# Altium footprint library TBA 1-1211E.PcbLib: 1 footprints
Each footprint in its own frame and in the unit in brackets; x right, y up, seen from the top. Pads: shape width x height; smd on the part's side, far side on the other; paste and mask are expansions set on the pad; w line width, h text height; cw(c..) or ccw(c..) is an arc to the next point about the centre after c.
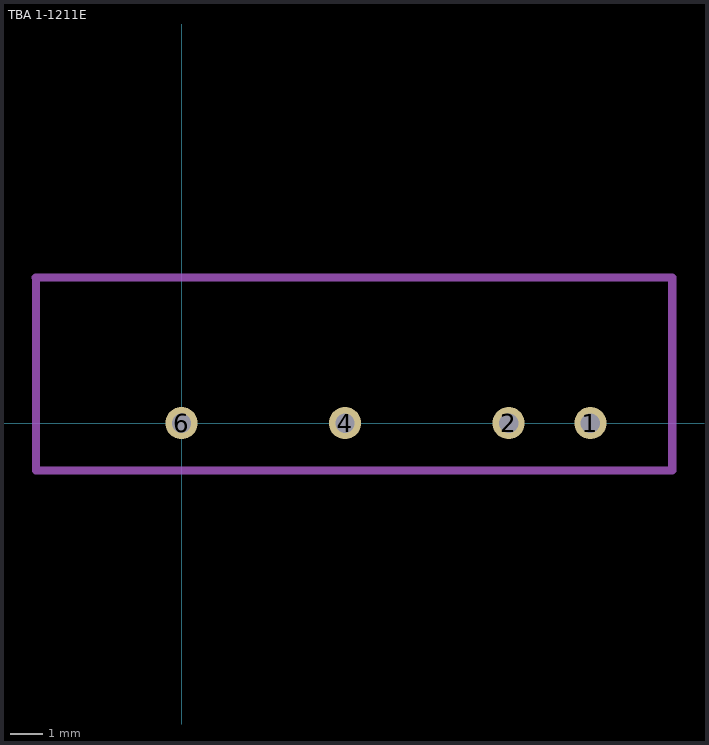
[diagram p0: the footprint, top view; thin cyan lines are the x and y axes]

## TBA 1-1211E [mm] "Converter: DC/DC; 1W; Uin: 10.8÷13.2VDC; Uout: 5VDC; Iout: 200mA"
height 9.5
pads (4):
  round 1 hole 0.6: 1(12.7,0) 2(10.16,0) 4(5.08,0) 6(0,0)
Mechanical 1:
  lines w0.254: -4.525,4.525 -2.4,4.525 15.24,4.525 15.24,-1.475 -2.4,-1.475 -4.523,-1.475 -4.523,4.523 -4.525,4.525
3D body "tba1e_single_3d_drawing.stp": height 10, standoff -3.05, extent -4.416,-1.397 15.084,4.603